# Altium footprint library SamacSys.PcbLib: 23 footprints (part 1 of 2)
Each footprint in its own frame and in the unit in brackets; x right, y up, seen from the top. Pads: shape width x height; smd on the part's side, far side on the other; paste and mask are expansions set on the pad; w line width, h text height; cw(c..) or ccw(c..) is an arc to the next point about the centre after c.
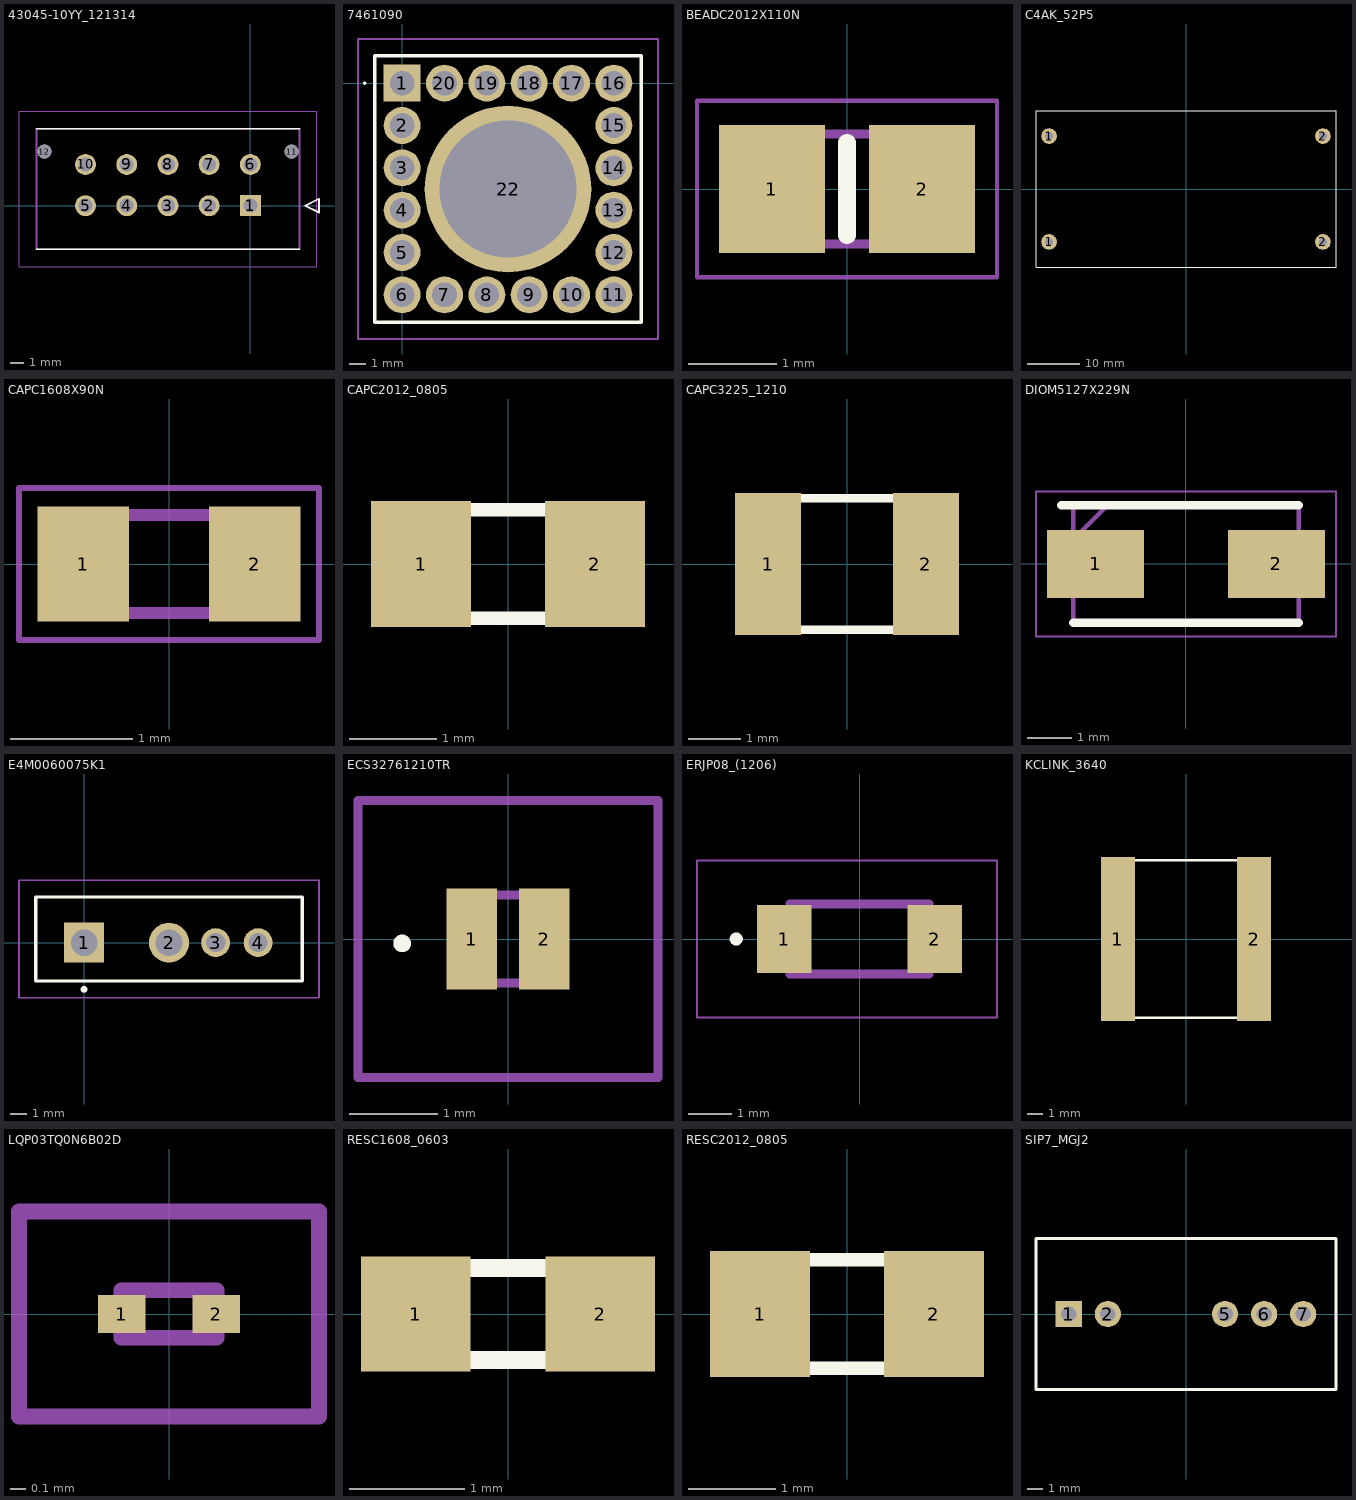
[diagram p0: the footprints below, top view; thin cyan lines are the x and y axes]

## 43045-10YY_121314 [mm]
pads (12):
  rect 1.52x1.52 hole 1.02: 1(0,0)
  round 1.52 hole 1.02: 2(-3,0) 3(-6,0) 4(-9,0) 5(-12,0) 6(0,3) 7(-3,3) 8(-6,3) 9(-9,3) 10(-12,3)
  round 1.02 hole 1.02 unplated: 11(3,3.94) 12(-15,3.94)
Top Overlay:
  lines w0.127: -15.575,-3.17 3.575,-3.17 ; -15.575,5.6 3.575,5.6 ; 4,0 5,0.5 5,-0.5 4,0
Mechanical 13:
  lines w0.127: -15.575,-3.17 -15.575,5.6 3.575,5.6 3.575,-3.17 -15.575,-3.17 ; 4,0 5,0.5 5,-0.5 4,0
Mechanical 15:
  lines w0.05: -16.845,-4.44 -16.845,6.87 4.845,6.87 4.845,-4.44 -16.845,-4.44
3D body "43045-1012.stp": height 9.75, standoff -3.33, extent -15.625,-2.59 3.525,6.18

## 7461090 [mm]
pads (21):
  rect 2.213x2.213 hole 1.475: 1(0,0)
  round 2.213 hole 1.475: 2(0,-2.54) 3(0,-5.08) 4(0,-7.62) 5(0,-10.16) 6(0,-12.7) 7(2.54,-12.7) 8(5.08,-12.7) 9(7.62,-12.7) 10(10.16,-12.7) 11(12.7,-12.7) 12(12.7,-10.16) 13(12.7,-7.62) 14(12.7,-5.08) 15(12.7,-2.54) 16(12.7,0) 17(10.16,0) 18(7.62,0) 19(5.08,0) 20(2.54,0)
  round 10 hole 8.2: 22(6.35,-6.35)
Top Overlay:
  lines w0.1: -2.3,0 ccw(c-2.25,0) -2.2,0 ccw(c-2.25,0) -2.3,0
  lines w0.2: -1.65,-14.35 -1.65,1.65 14.35,1.65 14.35,-14.35 -1.65,-14.35
Mechanical 13:
  lines w0.1: -1.65,-14.35 -1.65,1.65 14.35,1.65 14.35,-14.35 -1.65,-14.35
Mechanical 15:
  lines w0.1: -2.65,-15.35 -2.65,2.65 15.35,2.65 15.35,-15.35 -2.65,-15.35
3D body "7461090.stp": height 13.5, standoff -3.5, extent -1.65,-14.35 14.35,1.65

## BEADC2012X110N [mm]
pads (2):
  rect 1.2x1.45 smd: 1(-0.85,0) 2(0.85,0)
Top Overlay:
  lines w0.2: 0,-0.525 0,0.525
Mechanical 13:
  lines w0.1: -1,-0.625 -1,0.625 1,0.625 1,-0.625 -1,-0.625
Mechanical 15:
  lines w0.05: -1.7,-1 -1.7,1 1.7,1 1.7,-1 -1.7,-1
3D body "HZ0805D102R-10.stp": height 1.1, standoff 0, extent -1,-0.625 1,0.625

## C4AK_52P5 [mil] "KEMET C4AK box film capacitor, 4 leads 52.5 x 20.3 mm"
pads (4):
  round 118 hole 59: 1(-1033.5,-399.6) 1(-1033.5,399.6) 2(1033.5,-399.6) 2(1033.5,399.6)
Top Overlay:
  lines w8: -1131.9,-590.6 -1131.9,590.6 1131.9,590.6 1131.9,-590.6 -1131.9,-590.6
3D body "C4AKJBW5450A3MJ.stp": height 1818.9, standoff -157.48, extent -1155.51,-637.99 1155.51,590.55

## CAPC1608X90N [mm]
pads (2):
  rect 0.75x0.94 smd: 1(-0.7,0) 2(0.7,0)
Mechanical 13:
  lines w0.1: -0.8,-0.4 0.8,-0.4 0.8,0.4 -0.8,0.4 -0.8,-0.4
Mechanical 15:
  lines w0.05: -1.225,-0.62 1.225,-0.62 1.225,0.62 -1.225,0.62 -1.225,-0.62
3D body "GCM1885C1H220JA16D.stp": height 0.9, standoff 0, extent -0.8,-0.4 0.8,0.4

## CAPC2012_0805 [mm] "Chip capacitor 0805"
pads (2):
  rect 1.151x1.45 smd: 1(-1.001,0) 2(1.001,0)
Top Overlay:
  lines w0.152: -1.001,-0.625 1.001,-0.625 ; -1.001,0.625 1.001,0.625

## CAPC3225_1210 [mm] "Chip capacitor 1210"
pads (2):
  rect 1.25x2.7 smd: 1(-1.501,0) 2(1.501,0)
Top Overlay:
  lines w0.152: -1.6,-1.25 1.6,-1.25 ; -1.6,1.25 1.6,1.25

## DIOM5127X229N [mm]
pads (2):
  rect 2.2x1.55 smd: 1(-2.05,0) 2(2.05,0)
Top Overlay:
  lines w0.2: -2.825,1.332 2.552,1.332 ; -2.552,-1.332 2.552,-1.332
Mechanical 13:
  lines w0.1: -2.552,0.558 -1.778,1.332 ; -2.552,-1.332 -2.552,1.332 2.552,1.332 2.552,-1.332 -2.552,-1.332
Mechanical 15:
  lines w0.05: -3.4,-1.645 -3.4,1.645 3.4,1.645 3.4,-1.645 -3.4,-1.645
3D body "US1MHE3_61T.stp": height 3.6, standoff 3.6, extent -0.23,4.13 -0.23,4.13

## E4M0060075K1 [mm]
pads (4):
  rect 2.383x2.383 hole 1.589: 1(0,0)
  round 2.383 hole 1.589: 2(5.08,0)
  round 1.725 hole 1.15: 3(7.87,0) 4(10.41,0)
Top Overlay:
  lines w0.2: -2.89,-2.295 13.05,-2.295 13.05,2.725 -2.89,2.725 -2.89,-2.295 ; -0.1,-2.798 cw(c0,-2.798) 0.1,-2.798 cw(c0,-2.798) -0.1,-2.798
Mechanical 13:
  lines w0.1: -2.89,-2.295 -2.89,2.725 13.05,2.725 13.05,-2.295 -2.89,-2.295
Mechanical 15:
  lines w0.1: -3.89,-3.295 -3.89,3.725 14.05,3.725 14.05,-3.295 -3.89,-3.295
3D body "E4M0015075K1.stp": height 25.86, standoff -15.12, extent -2.893,-2.3 13.047,2.72

## ECS32761210TR [mm]
pads (2):
  rect 0.575x1.14 smd: 1(-0.412,0) 2(0.412,0)
Top Overlay:
  lines w0.1: -1.2,-0.1 cw(c-1.2,-0.05) -1.2,0 cw(c-1.2,-0.05) -1.2,-0.1
Mechanical 13:
  lines w0.1: -0.6,-0.5 0.6,-0.5 0.6,0.5 -0.6,0.5 -0.6,-0.5
Mechanical 15:
  lines w0.1: -1.7,-1.57 1.7,-1.57 1.7,1.57 -1.7,1.57 -1.7,-1.57
3D body "ECS-.327-6-1210-TR.stp": height 0.5, standoff 0, extent -0.6,-0.5 0.6,0.5

## ERJP08_(1206) [mm]
pads (2):
  rect 1.25x1.55 smd: 1(-1.725,0) 2(1.725,0)
Top Overlay:
  circle w0.2: c-2.825,0 r0.05
Mechanical 13:
  lines w0.2: -1.6,-0.8 1.6,-0.8 1.6,0.8 -1.6,0.8 -1.6,-0.8
Mechanical 15:
  lines w0.05: -3.725,-1.8 3.15,-1.8 3.15,1.8 -3.725,1.8 -3.725,-1.8
3D body "ERJ-P08F10R0V.stp": height 0.6, standoff 0, extent -1.6,-0.8 1.6,0.8

## KCLINK_3640 [mm] "KEMET KC-LINK 3640 stacked C0G"
pads (2):
  rect 2.2x10.599 smd: 1(-4.399,0) 2(4.399,0)
Top Overlay:
  lines w0.152: -4.549,-5.1 4.549,-5.1 ; -4.549,5.1 4.549,5.1
3D body "CKC33C454KWGLC7805.stp": height 0, standoff -9.9, extent 0,0 8.3,10.6

## LQP03TQ0N6B02D [mm]
pads (2):
  rect 0.3x0.24 smd: 1(-0.3,0) 2(0.3,0)
Mechanical 13:
  lines w0.1: -0.3,-0.15 0.3,-0.15 0.3,0.15 -0.3,0.15 -0.3,-0.15
Mechanical 15:
  lines w0.1: -0.95,-0.65 0.95,-0.65 0.95,0.65 -0.95,0.65 -0.95,-0.65
3D body "LQP03TQ5N6H02D.stp": height 0.32, standoff 0, extent -0.3,-0.15 0.3,0.15

## RESC1608_0603 [mil] "Chip 0603 (1608 metric)"
pads (2):
  rect 37.4x39.4 smd: 1(-31.5,0) 2(31.5,0)
Top Overlay:
  lines w6: -31.5,-15.7 31.5,-15.7 ; -31.5,15.7 31.5,15.7

## RESC2012_0805 [mm] "Chip 0805 (2012 metric)"
pads (2):
  rect 1.151x1.45 smd: 1(-1.001,0) 2(1.001,0)
Top Overlay:
  lines w0.152: -1.001,-0.625 1.001,-0.625 ; -1.001,0.625 1.001,0.625

## SIP7_MGJ2 [mil] "Murata MGJ2 SIP-7 (pins 1,2,5,6,7; 2.54 mm pitch)"
pads (5):
  rect 67x67 hole 39.4: 1(-300,0)
  round 67 hole 39.4: 2(-200,0) 5(100,0) 6(200,0) 7(300,0)
Top Overlay:
  lines w8: -383.9,-192.9 383.9,-192.9 383.9,192.9 -383.9,192.9 -383.9,-192.9